# Altium footprint library Package_DFN_QFN.PcbLib: 735 footprints (part 24 of 46)
Each footprint in its own frame and in the unit in brackets; x right, y up, seen from the top. Pads: shape width x height; smd on the part's side, far side on the other; paste and mask are expansions set on the pad; w line width, h text height; cw(c..) or ccw(c..) is an arc to the next point about the centre after c.
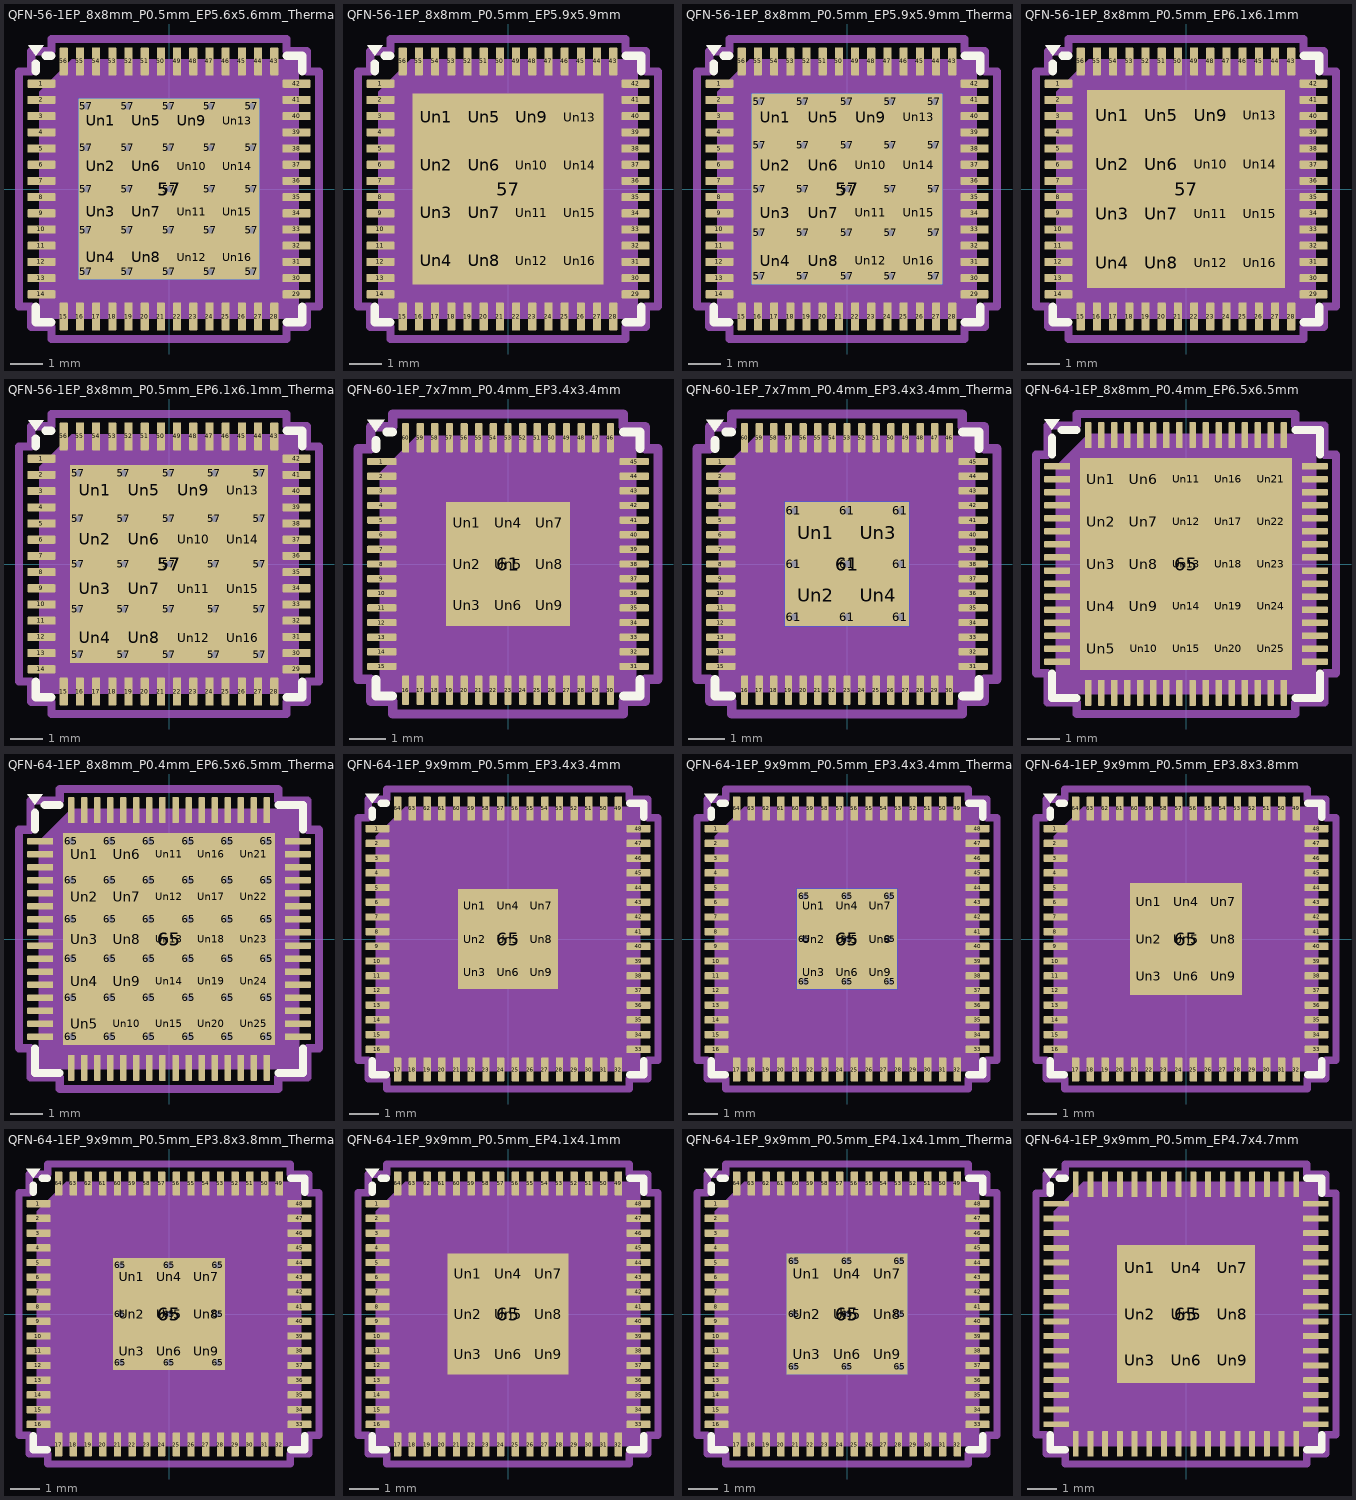
[diagram p23: the footprints below, top view; thin cyan lines are the x and y axes]

## QFN-56-1EP_8x8mm_P0.5mm_EP5.6x5.6mm_ThermalVias [mm] "QFN-56-1EP_8x8mm_P0.5mm_EP5.6x5.6mm_ThermalVias"
pads (99):
  rrect25% 0.875x0.25 smd: 1(-3.938,3.25) 2(-3.938,2.75) 3(-3.938,2.25) 4(-3.938,1.75) 5(-3.938,1.25) 6(-3.938,0.75) 7(-3.938,0.25) 8(-3.938,-0.25) 9(-3.938,-0.75) 10(-3.938,-1.25) 11(-3.938,-1.75) 12(-3.938,-2.25) 13(-3.938,-2.75) 14(-3.938,-3.25) 29(3.938,-3.25) 30(3.938,-2.75) 31(3.938,-2.25) 32(3.938,-1.75) 33(3.938,-1.25) 34(3.938,-0.75) 35(3.938,-0.25) 36(3.938,0.25) 37(3.938,0.75) 38(3.938,1.25) 39(3.938,1.75) 40(3.938,2.25) 41(3.938,2.75) 42(3.938,3.25)
  rrect25% 0.25x0.875 smd: 15(-3.25,-3.938) 16(-2.75,-3.938) 17(-2.25,-3.938) 18(-1.75,-3.938) 19(-1.25,-3.938) 20(-0.75,-3.938) 21(-0.25,-3.938) 22(0.25,-3.938) 23(0.75,-3.938) 24(1.25,-3.938) 25(1.75,-3.938) 26(2.25,-3.938) 27(2.75,-3.938) 28(3.25,-3.938) 43(3.25,3.938) 44(2.75,3.938) 45(2.25,3.938) 46(1.75,3.938) 47(1.25,3.938) 48(0.75,3.938) 49(0.25,3.938) 50(-0.25,3.938) 51(-0.75,3.938) 52(-1.25,3.938) 53(-1.75,3.938) 54(-2.25,3.938) 55(-2.75,3.938) 56(-3.25,3.938)
  round 0.5 hole 0.2: 57(-2.55,-2.55) 57(-2.55,-1.275) 57(-2.55,0) 57(-2.55,1.275) 57(-2.55,2.55) 57(-1.275,-2.55) 57(-1.275,-1.275) 57(-1.275,0) 57(-1.275,1.275) 57(-1.275,2.55) 57(0,-2.55) 57(0,-1.275) 57(0,0) 57(0,1.275) 57(0,2.55) 57(1.275,-2.55) 57(1.275,-1.275) 57(1.275,0) 57(1.275,1.275) 57(1.275,2.55) 57(2.55,-2.55) 57(2.55,-1.275) 57(2.55,0) 57(2.55,1.275) 57(2.55,2.55)
  rect 5.6x5.6 smd: 57(0,0)
  rect 5.6x5.6 smd far side: 57(0,0)
  rrect23% 1.08x1.08 on Top Paste: Un1(-2.1,2.1) Un2(-2.1,0.7) Un3(-2.1,-0.7) Un4(-2.1,-2.1) Un5(-0.7,2.1) Un6(-0.7,0.7) Un7(-0.7,-0.7) Un8(-0.7,-2.1) Un9(0.7,2.1) Un10(0.7,0.7) Un11(0.7,-0.7) Un12(0.7,-2.1) Un13(2.1,2.1) Un14(2.1,0.7) Un15(2.1,-0.7) Un16(2.1,-2.1)
F.SilkS:
  region: -4.11,4.11 -4.35,4.44 -3.87,4.44
  lines w0.254: -4.11,-3.635 -4.11,-4.11 -3.635,-4.11 ; -4.11,3.635 -4.11,3.87 ; -3.81,4.11 -3.635,4.11 ; 3.635,-4.11 4.11,-4.11 4.11,-3.635 ; 3.635,4.11 4.11,4.11 4.11,3.635
Top Component Center:
  lines w0.127: -0.127,0 0.127,0 -0.127,0 ; 0,-0.127 0,0.127 0,-0.127
Top Assembly:
  region: 4,-4 -4,-4 -4,3 -3,4 4,4
Top Courtyard:
  lines w0.254: -4.63,-3.63 -4.63,3.63 -4.25,3.63 -4.25,4.25 -3.63,4.25 -3.63,4.63 3.63,4.63 3.63,4.25 4.25,4.25 4.25,3.63 4.63,3.63 4.63,-3.63 4.25,-3.63 4.25,-4.25 3.63,-4.25 3.63,-4.63 -3.63,-4.63 -3.63,-4.25 -4.25,-4.25 -4.25,-3.63 -4.63,-3.63
Top Designator:
  text ".Designator" at -3.43,-0.344 h1.52
3D body "QFN-56-1EP_8x8mm_P0.5mm_EP4.5x5.2mm.step": height 1, standoff 0, extent -4,-4 4,4

## QFN-56-1EP_8x8mm_P0.5mm_EP5.9x5.9mm [mm] "QFN-56-1EP_8x8mm_P0.5mm_EP5.9x5.9mm"
pads (73):
  rrect25% 0.875x0.25 smd: 1(-3.938,3.25) 2(-3.938,2.75) 3(-3.938,2.25) 4(-3.938,1.75) 5(-3.938,1.25) 6(-3.938,0.75) 7(-3.938,0.25) 8(-3.938,-0.25) 9(-3.938,-0.75) 10(-3.938,-1.25) 11(-3.938,-1.75) 12(-3.938,-2.25) 13(-3.938,-2.75) 14(-3.938,-3.25) 29(3.938,-3.25) 30(3.938,-2.75) 31(3.938,-2.25) 32(3.938,-1.75) 33(3.938,-1.25) 34(3.938,-0.75) 35(3.938,-0.25) 36(3.938,0.25) 37(3.938,0.75) 38(3.938,1.25) 39(3.938,1.75) 40(3.938,2.25) 41(3.938,2.75) 42(3.938,3.25)
  rrect25% 0.25x0.875 smd: 15(-3.25,-3.938) 16(-2.75,-3.938) 17(-2.25,-3.938) 18(-1.75,-3.938) 19(-1.25,-3.938) 20(-0.75,-3.938) 21(-0.25,-3.938) 22(0.25,-3.938) 23(0.75,-3.938) 24(1.25,-3.938) 25(1.75,-3.938) 26(2.25,-3.938) 27(2.75,-3.938) 28(3.25,-3.938) 43(3.25,3.938) 44(2.75,3.938) 45(2.25,3.938) 46(1.75,3.938) 47(1.25,3.938) 48(0.75,3.938) 49(0.25,3.938) 50(-0.25,3.938) 51(-0.75,3.938) 52(-1.25,3.938) 53(-1.75,3.938) 54(-2.25,3.938) 55(-2.75,3.938) 56(-3.25,3.938)
  rect 5.9x5.9 smd: 57(0,0)
  rrect21% 1.19x1.19 on Top Paste: Un1(-2.22,2.22) Un2(-2.22,0.74) Un3(-2.22,-0.74) Un4(-2.22,-2.22) Un5(-0.74,2.22) Un6(-0.74,0.74) Un7(-0.74,-0.74) Un8(-0.74,-2.22) Un9(0.74,2.22) Un10(0.74,0.74) Un11(0.74,-0.74) Un12(0.74,-2.22) Un13(2.22,2.22) Un14(2.22,0.74) Un15(2.22,-0.74) Un16(2.22,-2.22)
F.SilkS:
  region: -4.11,4.11 -4.35,4.44 -3.87,4.44
  lines w0.254: -4.11,-3.635 -4.11,-4.11 -3.635,-4.11 ; -4.11,3.635 -4.11,3.87 ; -3.81,4.11 -3.635,4.11 ; 3.635,-4.11 4.11,-4.11 4.11,-3.635 ; 3.635,4.11 4.11,4.11 4.11,3.635
Top Component Center:
  lines w0.127: -0.127,0 0.127,0 -0.127,0 ; 0,-0.127 0,0.127 0,-0.127
Top Assembly:
  region: 4,-4 -4,-4 -4,3 -3,4 4,4
Top Courtyard:
  lines w0.254: -4.63,-3.63 -4.63,3.63 -4.25,3.63 -4.25,4.25 -3.63,4.25 -3.63,4.63 3.63,4.63 3.63,4.25 4.25,4.25 4.25,3.63 4.63,3.63 4.63,-3.63 4.25,-3.63 4.25,-4.25 3.63,-4.25 3.63,-4.63 -3.63,-4.63 -3.63,-4.25 -4.25,-4.25 -4.25,-3.63 -4.63,-3.63
Top Designator:
  text ".Designator" at -3.43,-0.344 h1.52
3D body "QFN-56-1EP_8x8mm_P0.5mm_EP4.5x5.2mm.step": height 1, standoff 0, extent -4,-4 4,4

## QFN-56-1EP_8x8mm_P0.5mm_EP5.9x5.9mm_ThermalVias [mm] "QFN-56-1EP_8x8mm_P0.5mm_EP5.9x5.9mm_ThermalVias"
pads (99):
  rrect25% 0.875x0.25 smd: 1(-3.938,3.25) 2(-3.938,2.75) 3(-3.938,2.25) 4(-3.938,1.75) 5(-3.938,1.25) 6(-3.938,0.75) 7(-3.938,0.25) 8(-3.938,-0.25) 9(-3.938,-0.75) 10(-3.938,-1.25) 11(-3.938,-1.75) 12(-3.938,-2.25) 13(-3.938,-2.75) 14(-3.938,-3.25) 29(3.938,-3.25) 30(3.938,-2.75) 31(3.938,-2.25) 32(3.938,-1.75) 33(3.938,-1.25) 34(3.938,-0.75) 35(3.938,-0.25) 36(3.938,0.25) 37(3.938,0.75) 38(3.938,1.25) 39(3.938,1.75) 40(3.938,2.25) 41(3.938,2.75) 42(3.938,3.25)
  rrect25% 0.25x0.875 smd: 15(-3.25,-3.938) 16(-2.75,-3.938) 17(-2.25,-3.938) 18(-1.75,-3.938) 19(-1.25,-3.938) 20(-0.75,-3.938) 21(-0.25,-3.938) 22(0.25,-3.938) 23(0.75,-3.938) 24(1.25,-3.938) 25(1.75,-3.938) 26(2.25,-3.938) 27(2.75,-3.938) 28(3.25,-3.938) 43(3.25,3.938) 44(2.75,3.938) 45(2.25,3.938) 46(1.75,3.938) 47(1.25,3.938) 48(0.75,3.938) 49(0.25,3.938) 50(-0.25,3.938) 51(-0.75,3.938) 52(-1.25,3.938) 53(-1.75,3.938) 54(-2.25,3.938) 55(-2.75,3.938) 56(-3.25,3.938)
  round 0.5 hole 0.2: 57(-2.7,-2.7) 57(-2.7,-1.35) 57(-2.7,0) 57(-2.7,1.35) 57(-2.7,2.7) 57(-1.35,-2.7) 57(-1.35,-1.35) 57(-1.35,0) 57(-1.35,1.35) 57(-1.35,2.7) 57(0,-2.7) 57(0,-1.35) 57(0,0) 57(0,1.35) 57(0,2.7) 57(1.35,-2.7) 57(1.35,-1.35) 57(1.35,0) 57(1.35,1.35) 57(1.35,2.7) 57(2.7,-2.7) 57(2.7,-1.35) 57(2.7,0) 57(2.7,1.35) 57(2.7,2.7)
  rect 5.9x5.9 smd: 57(0,0)
  rect 5.9x5.9 smd far side: 57(0,0)
  rrect22% 1.14x1.14 on Top Paste: Un1(-2.22,2.22) Un2(-2.22,0.74) Un3(-2.22,-0.74) Un4(-2.22,-2.22) Un5(-0.74,2.22) Un6(-0.74,0.74) Un7(-0.74,-0.74) Un8(-0.74,-2.22) Un9(0.74,2.22) Un10(0.74,0.74) Un11(0.74,-0.74) Un12(0.74,-2.22) Un13(2.22,2.22) Un14(2.22,0.74) Un15(2.22,-0.74) Un16(2.22,-2.22)
F.SilkS:
  region: -4.11,4.11 -4.35,4.44 -3.87,4.44
  lines w0.254: -4.11,-3.635 -4.11,-4.11 -3.635,-4.11 ; -4.11,3.635 -4.11,3.87 ; -3.81,4.11 -3.635,4.11 ; 3.635,-4.11 4.11,-4.11 4.11,-3.635 ; 3.635,4.11 4.11,4.11 4.11,3.635
Top Component Center:
  lines w0.127: -0.127,0 0.127,0 -0.127,0 ; 0,-0.127 0,0.127 0,-0.127
Top Assembly:
  region: 4,-4 -4,-4 -4,3 -3,4 4,4
Top Courtyard:
  lines w0.254: -4.63,-3.63 -4.63,3.63 -4.25,3.63 -4.25,4.25 -3.63,4.25 -3.63,4.63 3.63,4.63 3.63,4.25 4.25,4.25 4.25,3.63 4.63,3.63 4.63,-3.63 4.25,-3.63 4.25,-4.25 3.63,-4.25 3.63,-4.63 -3.63,-4.63 -3.63,-4.25 -4.25,-4.25 -4.25,-3.63 -4.63,-3.63
Top Designator:
  text ".Designator" at -3.43,-0.344 h1.52

## QFN-56-1EP_8x8mm_P0.5mm_EP6.1x6.1mm [mm] "QFN-56-1EP_8x8mm_P0.5mm_EP6.1x6.1mm"
pads (73):
  rrect25% 0.875x0.25 smd: 1(-3.938,3.25) 2(-3.938,2.75) 3(-3.938,2.25) 4(-3.938,1.75) 5(-3.938,1.25) 6(-3.938,0.75) 7(-3.938,0.25) 8(-3.938,-0.25) 9(-3.938,-0.75) 10(-3.938,-1.25) 11(-3.938,-1.75) 12(-3.938,-2.25) 13(-3.938,-2.75) 14(-3.938,-3.25) 29(3.938,-3.25) 30(3.938,-2.75) 31(3.938,-2.25) 32(3.938,-1.75) 33(3.938,-1.25) 34(3.938,-0.75) 35(3.938,-0.25) 36(3.938,0.25) 37(3.938,0.75) 38(3.938,1.25) 39(3.938,1.75) 40(3.938,2.25) 41(3.938,2.75) 42(3.938,3.25)
  rrect25% 0.25x0.875 smd: 15(-3.25,-3.938) 16(-2.75,-3.938) 17(-2.25,-3.938) 18(-1.75,-3.938) 19(-1.25,-3.938) 20(-0.75,-3.938) 21(-0.25,-3.938) 22(0.25,-3.938) 23(0.75,-3.938) 24(1.25,-3.938) 25(1.75,-3.938) 26(2.25,-3.938) 27(2.75,-3.938) 28(3.25,-3.938) 43(3.25,3.938) 44(2.75,3.938) 45(2.25,3.938) 46(1.75,3.938) 47(1.25,3.938) 48(0.75,3.938) 49(0.25,3.938) 50(-0.25,3.938) 51(-0.75,3.938) 52(-1.25,3.938) 53(-1.75,3.938) 54(-2.25,3.938) 55(-2.75,3.938) 56(-3.25,3.938)
  rect 6.1x6.1 smd: 57(0,0)
  rrect20% 1.23x1.23 on Top Paste: Un1(-2.28,2.28) Un2(-2.28,0.76) Un3(-2.28,-0.76) Un4(-2.28,-2.28) Un5(-0.76,2.28) Un6(-0.76,0.76) Un7(-0.76,-0.76) Un8(-0.76,-2.28) Un9(0.76,2.28) Un10(0.76,0.76) Un11(0.76,-0.76) Un12(0.76,-2.28) Un13(2.28,2.28) Un14(2.28,0.76) Un15(2.28,-0.76) Un16(2.28,-2.28)
F.SilkS:
  region: -4.11,4.11 -4.35,4.44 -3.87,4.44
  lines w0.254: -4.11,-3.635 -4.11,-4.11 -3.635,-4.11 ; -4.11,3.635 -4.11,3.87 ; -3.81,4.11 -3.635,4.11 ; 3.635,-4.11 4.11,-4.11 4.11,-3.635 ; 3.635,4.11 4.11,4.11 4.11,3.635
Top Component Center:
  lines w0.127: -0.127,0 0.127,0 -0.127,0 ; 0,-0.127 0,0.127 0,-0.127
Top Assembly:
  region: 4,-4 -4,-4 -4,3 -3,4 4,4
Top Courtyard:
  lines w0.254: -4.63,-3.63 -4.25,-3.63 -4.25,-4.25 -3.63,-4.25 -3.63,-4.63 3.63,-4.63 3.63,-4.25 4.25,-4.25 4.25,-3.63 4.63,-3.63 4.63,3.63 4.25,3.63 4.25,4.25 3.63,4.25 3.63,4.63 -3.63,4.63 -3.63,4.25 -4.25,4.25 -4.25,3.63 -4.63,3.63 -4.63,-3.63
Top Designator:
  text ".Designator" at -3.43,-0.344 h1.52
3D body "QFN-56-1EP_8x8mm_P0.5mm_EP4.5x5.2mm.step": height 1, standoff 0, extent -4,-4 4,4

## QFN-56-1EP_8x8mm_P0.5mm_EP6.1x6.1mm_ThermalVias [mm] "QFN-56-1EP_8x8mm_P0.5mm_EP6.1x6.1mm_ThermalVias"
pads (99):
  rrect25% 0.875x0.25 smd: 1(-3.938,3.25) 2(-3.938,2.75) 3(-3.938,2.25) 4(-3.938,1.75) 5(-3.938,1.25) 6(-3.938,0.75) 7(-3.938,0.25) 8(-3.938,-0.25) 9(-3.938,-0.75) 10(-3.938,-1.25) 11(-3.938,-1.75) 12(-3.938,-2.25) 13(-3.938,-2.75) 14(-3.938,-3.25) 29(3.938,-3.25) 30(3.938,-2.75) 31(3.938,-2.25) 32(3.938,-1.75) 33(3.938,-1.25) 34(3.938,-0.75) 35(3.938,-0.25) 36(3.938,0.25) 37(3.938,0.75) 38(3.938,1.25) 39(3.938,1.75) 40(3.938,2.25) 41(3.938,2.75) 42(3.938,3.25)
  rrect25% 0.25x0.875 smd: 15(-3.25,-3.938) 16(-2.75,-3.938) 17(-2.25,-3.938) 18(-1.75,-3.938) 19(-1.25,-3.938) 20(-0.75,-3.938) 21(-0.25,-3.938) 22(0.25,-3.938) 23(0.75,-3.938) 24(1.25,-3.938) 25(1.75,-3.938) 26(2.25,-3.938) 27(2.75,-3.938) 28(3.25,-3.938) 43(3.25,3.938) 44(2.75,3.938) 45(2.25,3.938) 46(1.75,3.938) 47(1.25,3.938) 48(0.75,3.938) 49(0.25,3.938) 50(-0.25,3.938) 51(-0.75,3.938) 52(-1.25,3.938) 53(-1.75,3.938) 54(-2.25,3.938) 55(-2.75,3.938) 56(-3.25,3.938)
  round 0.5 hole 0.2: 57(-2.8,-2.8) 57(-2.8,-1.4) 57(-2.8,0) 57(-2.8,1.4) 57(-2.8,2.8) 57(-1.4,-2.8) 57(-1.4,-1.4) 57(-1.4,0) 57(-1.4,1.4) 57(-1.4,2.8) 57(0,-2.8) 57(0,-1.4) 57(0,0) 57(0,1.4) 57(0,2.8) 57(1.4,-2.8) 57(1.4,-1.4) 57(1.4,0) 57(1.4,1.4) 57(1.4,2.8) 57(2.8,-2.8) 57(2.8,-1.4) 57(2.8,0) 57(2.8,1.4) 57(2.8,2.8)
  rect 6.1x6.1 smd: 57(0,0)
  rect 6.1x6.1 smd far side: 57(0,0)
  rrect21% 1.18x1.18 on Top Paste: Un1(-2.28,2.28) Un2(-2.28,0.76) Un3(-2.28,-0.76) Un4(-2.28,-2.28) Un5(-0.76,2.28) Un6(-0.76,0.76) Un7(-0.76,-0.76) Un8(-0.76,-2.28) Un9(0.76,2.28) Un10(0.76,0.76) Un11(0.76,-0.76) Un12(0.76,-2.28) Un13(2.28,2.28) Un14(2.28,0.76) Un15(2.28,-0.76) Un16(2.28,-2.28)
F.SilkS:
  region: -4.11,4.11 -4.35,4.44 -3.87,4.44
  lines w0.254: -4.11,-3.635 -4.11,-4.11 -3.635,-4.11 ; -4.11,3.635 -4.11,3.87 ; -3.81,4.11 -3.635,4.11 ; 3.635,-4.11 4.11,-4.11 4.11,-3.635 ; 3.635,4.11 4.11,4.11 4.11,3.635
Top Component Center:
  lines w0.127: -0.127,0 0.127,0 -0.127,0 ; 0,-0.127 0,0.127 0,-0.127
Top Assembly:
  region: 4,-4 -4,-4 -4,3 -3,4 4,4
Top Courtyard:
  lines w0.254: -4.63,-3.63 -4.63,3.63 -4.25,3.63 -4.25,4.25 -3.63,4.25 -3.63,4.63 3.63,4.63 3.63,4.25 4.25,4.25 4.25,3.63 4.63,3.63 4.63,-3.63 4.25,-3.63 4.25,-4.25 3.63,-4.25 3.63,-4.63 -3.63,-4.63 -3.63,-4.25 -4.25,-4.25 -4.25,-3.63 -4.63,-3.63
Top Designator:
  text ".Designator" at -3.43,-0.344 h1.52
3D body "QFN-56-1EP_8x8mm_P0.5mm_EP4.5x5.2mm.step": height 1, standoff 0, extent -4,-4 4,4

## QFN-60-1EP_7x7mm_P0.4mm_EP3.4x3.4mm [mm] "QFN-60-1EP_7x7mm_P0.4mm_EP3.4x3.4mm"
pads (70):
  rrect25% 0.8x0.2 smd: 1(-3.45,2.8) 2(-3.45,2.4) 3(-3.45,2) 4(-3.45,1.6) 5(-3.45,1.2) 6(-3.45,0.8) 7(-3.45,0.4) 8(-3.45,0) 9(-3.45,-0.4) 10(-3.45,-0.8) 11(-3.45,-1.2) 12(-3.45,-1.6) 13(-3.45,-2) 14(-3.45,-2.4) 15(-3.45,-2.8) 31(3.45,-2.8) 32(3.45,-2.4) 33(3.45,-2) 34(3.45,-1.6) 35(3.45,-1.2) 36(3.45,-0.8) 37(3.45,-0.4) 38(3.45,0) 39(3.45,0.4) 40(3.45,0.8) 41(3.45,1.2) 42(3.45,1.6) 43(3.45,2) 44(3.45,2.4) 45(3.45,2.8)
  rrect25% 0.2x0.8 smd: 16(-2.8,-3.45) 17(-2.4,-3.45) 18(-2,-3.45) 19(-1.6,-3.45) 20(-1.2,-3.45) 21(-0.8,-3.45) 22(-0.4,-3.45) 23(0,-3.45) 24(0.4,-3.45) 25(0.8,-3.45) 26(1.2,-3.45) 27(1.6,-3.45) 28(2,-3.45) 29(2.4,-3.45) 30(2.8,-3.45) 46(2.8,3.45) 47(2.4,3.45) 48(2,3.45) 49(1.6,3.45) 50(1.2,3.45) 51(0.8,3.45) 52(0.4,3.45) 53(0,3.45) 54(-0.4,3.45) 55(-0.8,3.45) 56(-1.2,3.45) 57(-1.6,3.45) 58(-2,3.45) 59(-2.4,3.45) 60(-2.8,3.45)
  rect 3.4x3.4 smd: 61(0,0)
  rrect25% 0.91x0.91 on Top Paste: Un1(-1.13,1.13) Un2(-1.13,0) Un3(-1.13,-1.13) Un4(0,1.13) Un5(0,0) Un6(0,-1.13) Un7(1.13,1.13) Un8(1.13,0) Un9(1.13,-1.13)
F.SilkS:
  region: -3.61,3.61 -3.85,3.94 -3.37,3.94
  lines w0.254: -3.61,-3.16 -3.61,-3.61 -3.16,-3.61 ; -3.61,3.16 -3.61,3.37 ; -3.31,3.61 -3.16,3.61 ; 3.16,-3.61 3.61,-3.61 3.61,-3.16 ; 3.16,3.61 3.61,3.61 3.61,3.16
Top Component Center:
  lines w0.127: -0.127,0 0.127,0 -0.127,0 ; 0,-0.127 0,0.127 0,-0.127
Top Assembly:
  region: 3.5,-3.5 -3.5,-3.5 -3.5,2.5 -2.5,3.5 3.5,3.5
Top Courtyard:
  lines w0.254: -4.1,-3.15 -3.75,-3.15 -3.75,-3.75 -3.15,-3.75 -3.15,-4.1 3.15,-4.1 3.15,-3.75 3.75,-3.75 3.75,-3.15 4.1,-3.15 4.1,3.15 3.75,3.15 3.75,3.75 3.15,3.75 3.15,4.1 -3.15,4.1 -3.15,3.75 -3.75,3.75 -3.75,3.15 -4.1,3.15 -4.1,-3.15
Top Designator:
  text ".Designator" at -3.43,-0.344 h1.52

## QFN-60-1EP_7x7mm_P0.4mm_EP3.4x3.4mm_ThermalVias [mm] "QFN-60-1EP_7x7mm_P0.4mm_EP3.4x3.4mm_ThermalVias"
pads (75):
  rrect25% 0.8x0.2 smd: 1(-3.45,2.8) 2(-3.45,2.4) 3(-3.45,2) 4(-3.45,1.6) 5(-3.45,1.2) 6(-3.45,0.8) 7(-3.45,0.4) 8(-3.45,0) 9(-3.45,-0.4) 10(-3.45,-0.8) 11(-3.45,-1.2) 12(-3.45,-1.6) 13(-3.45,-2) 14(-3.45,-2.4) 15(-3.45,-2.8) 31(3.45,-2.8) 32(3.45,-2.4) 33(3.45,-2) 34(3.45,-1.6) 35(3.45,-1.2) 36(3.45,-0.8) 37(3.45,-0.4) 38(3.45,0) 39(3.45,0.4) 40(3.45,0.8) 41(3.45,1.2) 42(3.45,1.6) 43(3.45,2) 44(3.45,2.4) 45(3.45,2.8)
  rrect25% 0.2x0.8 smd: 16(-2.8,-3.45) 17(-2.4,-3.45) 18(-2,-3.45) 19(-1.6,-3.45) 20(-1.2,-3.45) 21(-0.8,-3.45) 22(-0.4,-3.45) 23(0,-3.45) 24(0.4,-3.45) 25(0.8,-3.45) 26(1.2,-3.45) 27(1.6,-3.45) 28(2,-3.45) 29(2.4,-3.45) 30(2.8,-3.45) 46(2.8,3.45) 47(2.4,3.45) 48(2,3.45) 49(1.6,3.45) 50(1.2,3.45) 51(0.8,3.45) 52(0.4,3.45) 53(0,3.45) 54(-0.4,3.45) 55(-0.8,3.45) 56(-1.2,3.45) 57(-1.6,3.45) 58(-2,3.45) 59(-2.4,3.45) 60(-2.8,3.45)
  round 0.5 hole 0.2: 61(-1.45,-1.45) 61(-1.45,0) 61(-1.45,1.45) 61(0,-1.45) 61(0,0) 61(0,1.45) 61(1.45,-1.45) 61(1.45,0) 61(1.45,1.45)
  rect 3.4x3.4 smd: 61(0,0)
  rect 3.4x3.4 smd far side: 61(0,0)
  rrect19% 1.32x1.32 on Top Paste: Un1(-0.85,0.85) Un2(-0.85,-0.85) Un3(0.85,0.85) Un4(0.85,-0.85)
F.SilkS:
  region: -3.61,3.61 -3.85,3.94 -3.37,3.94
  lines w0.254: -3.61,-3.16 -3.61,-3.61 -3.16,-3.61 ; -3.61,3.16 -3.61,3.37 ; -3.31,3.61 -3.16,3.61 ; 3.16,-3.61 3.61,-3.61 3.61,-3.16 ; 3.16,3.61 3.61,3.61 3.61,3.16
Top Component Center:
  lines w0.127: -0.127,0 0.127,0 -0.127,0 ; 0,-0.127 0,0.127 0,-0.127
Top Assembly:
  region: 3.5,-3.5 -3.5,-3.5 -3.5,2.5 -2.5,3.5 3.5,3.5
Top Courtyard:
  lines w0.254: -4.1,-3.15 -4.1,3.15 -3.75,3.15 -3.75,3.75 -3.15,3.75 -3.15,4.1 3.15,4.1 3.15,3.75 3.75,3.75 3.75,3.15 4.1,3.15 4.1,-3.15 3.75,-3.15 3.75,-3.75 3.15,-3.75 3.15,-4.1 -3.15,-4.1 -3.15,-3.75 -3.75,-3.75 -3.75,-3.15 -4.1,-3.15
Top Designator:
  text ".Designator" at -3.43,-0.344 h1.52

## QFN-64-1EP_8x8mm_P0.4mm_EP6.5x6.5mm [mm] "QFN-64-1EP_8x8mm_P0.4mm_EP6.5x6.5mm"
pads (90):
  rrect25% 0.8x0.2 smd: 1(-3.95,3) 2(-3.95,2.6) 3(-3.95,2.2) 4(-3.95,1.8) 5(-3.95,1.4) 6(-3.95,1) 7(-3.95,0.6) 8(-3.95,0.2) 9(-3.95,-0.2) 10(-3.95,-0.6) 11(-3.95,-1) 12(-3.95,-1.4) 13(-3.95,-1.8) 14(-3.95,-2.2) 15(-3.95,-2.6) 16(-3.95,-3) 33(3.95,-3) 34(3.95,-2.6) 35(3.95,-2.2) 36(3.95,-1.8) 37(3.95,-1.4) 38(3.95,-1) 39(3.95,-0.6) 40(3.95,-0.2) 41(3.95,0.2) 42(3.95,0.6) 43(3.95,1) 44(3.95,1.4) 45(3.95,1.8) 46(3.95,2.2) 47(3.95,2.6) 48(3.95,3)
  rrect25% 0.2x0.8 smd: 17(-3,-3.95) 18(-2.6,-3.95) 19(-2.2,-3.95) 20(-1.8,-3.95) 21(-1.4,-3.95) 22(-1,-3.95) 23(-0.6,-3.95) 24(-0.2,-3.95) 25(0.2,-3.95) 26(0.6,-3.95) 27(1,-3.95) 28(1.4,-3.95) 29(1.8,-3.95) 30(2.2,-3.95) 31(2.6,-3.95) 32(3,-3.95) 49(3,3.95) 50(2.6,3.95) 51(2.2,3.95) 52(1.8,3.95) 53(1.4,3.95) 54(1,3.95) 55(0.6,3.95) 56(0.2,3.95) 57(-0.2,3.95) 58(-0.6,3.95) 59(-1,3.95) 60(-1.4,3.95) 61(-1.8,3.95) 62(-2.2,3.95) 63(-2.6,3.95) 64(-3,3.95)
  rect 6.5x6.5 smd: 65(0,0)
  rrect24% 1.05x1.05 on Top Paste: Un1(-2.6,2.6) Un2(-2.6,1.3) Un3(-2.6,0) Un4(-2.6,-1.3) Un5(-2.6,-2.6) Un6(-1.3,2.6) Un7(-1.3,1.3) Un8(-1.3,0) Un9(-1.3,-1.3) Un10(-1.3,-2.6) Un11(0,2.6) Un12(0,1.3) Un13(0,0) Un14(0,-1.3) Un15(0,-2.6) Un16(1.3,2.6) Un17(1.3,1.3) Un18(1.3,0) Un19(1.3,-1.3) Un20(1.3,-2.6) Un21(2.6,2.6) Un22(2.6,1.3) Un23(2.6,0) Un24(2.6,-1.3) Un25(2.6,-2.6)
F.SilkS:
  region: -4.11,4.11 -4.35,4.44 -3.87,4.44
  lines w0.254: -4.11,-3.36 -4.11,-4.11 -3.36,-4.11 ; -4.11,3.36 -4.11,3.87 ; -3.81,4.11 -3.36,4.11 ; 3.36,-4.11 4.11,-4.11 4.11,-3.36 ; 3.36,4.11 4.11,4.11 4.11,3.36
Top Component Center:
  lines w0.127: -0.127,0 0.127,0 -0.127,0 ; 0,-0.127 0,0.127 0,-0.127
Top Assembly:
  region: 4,-4 -4,-4 -4,3 -3,4 4,4
Top Courtyard:
  lines w0.254: -4.6,-3.35 -4.25,-3.35 -4.25,-4.25 -3.35,-4.25 -3.35,-4.6 3.35,-4.6 3.35,-4.25 4.25,-4.25 4.25,-3.35 4.6,-3.35 4.6,3.35 4.25,3.35 4.25,4.25 3.35,4.25 3.35,4.6 -3.35,4.6 -3.35,4.25 -4.25,4.25 -4.25,3.35 -4.6,3.35 -4.6,-3.35
Top Designator:
  text ".Designator" at -3.43,-0.344 h1.52
3D body "QFN-64-1EP_8x8mm_P0.4mm_EP6.5x6.5mm.step": height 0.87, standoff 0, extent -4,-4 4,4

## QFN-64-1EP_8x8mm_P0.4mm_EP6.5x6.5mm_ThermalVias [mm] "QFN-64-1EP_8x8mm_P0.4mm_EP6.5x6.5mm_ThermalVias"
pads (127):
  rrect25% 0.8x0.2 smd: 1(-3.95,3) 2(-3.95,2.6) 3(-3.95,2.2) 4(-3.95,1.8) 5(-3.95,1.4) 6(-3.95,1) 7(-3.95,0.6) 8(-3.95,0.2) 9(-3.95,-0.2) 10(-3.95,-0.6) 11(-3.95,-1) 12(-3.95,-1.4) 13(-3.95,-1.8) 14(-3.95,-2.2) 15(-3.95,-2.6) 16(-3.95,-3) 33(3.95,-3) 34(3.95,-2.6) 35(3.95,-2.2) 36(3.95,-1.8) 37(3.95,-1.4) 38(3.95,-1) 39(3.95,-0.6) 40(3.95,-0.2) 41(3.95,0.2) 42(3.95,0.6) 43(3.95,1) 44(3.95,1.4) 45(3.95,1.8) 46(3.95,2.2) 47(3.95,2.6) 48(3.95,3)
  rrect25% 0.2x0.8 smd: 17(-3,-3.95) 18(-2.6,-3.95) 19(-2.2,-3.95) 20(-1.8,-3.95) 21(-1.4,-3.95) 22(-1,-3.95) 23(-0.6,-3.95) 24(-0.2,-3.95) 25(0.2,-3.95) 26(0.6,-3.95) 27(1,-3.95) 28(1.4,-3.95) 29(1.8,-3.95) 30(2.2,-3.95) 31(2.6,-3.95) 32(3,-3.95) 49(3,3.95) 50(2.6,3.95) 51(2.2,3.95) 52(1.8,3.95) 53(1.4,3.95) 54(1,3.95) 55(0.6,3.95) 56(0.2,3.95) 57(-0.2,3.95) 58(-0.6,3.95) 59(-1,3.95) 60(-1.4,3.95) 61(-1.8,3.95) 62(-2.2,3.95) 63(-2.6,3.95) 64(-3,3.95)
  round 0.5 hole 0.2: 65(-3,-3) 65(-3,-1.8) 65(-3,-0.6) 65(-3,0.6) 65(-3,1.8) 65(-3,3) 65(-1.8,-3) 65(-1.8,-1.8) 65(-1.8,-0.6) 65(-1.8,0.6) 65(-1.8,1.8) 65(-1.8,3) 65(-0.6,-3) 65(-0.6,-1.8) 65(-0.6,-0.6) 65(-0.6,0.6) 65(-0.6,1.8) 65(-0.6,3) 65(0.6,-3) 65(0.6,-1.8) 65(0.6,-0.6) 65(0.6,0.6) 65(0.6,1.8) 65(0.6,3) 65(1.8,-3) 65(1.8,-1.8) 65(1.8,-0.6) 65(1.8,0.6) 65(1.8,1.8) 65(1.8,3) 65(3,-3) 65(3,-1.8) 65(3,-0.6) 65(3,0.6) 65(3,1.8) 65(3,3)
  rect 6.5x6.5 smd: 65(0,0)
  rect 6.5x6.5 smd far side: 65(0,0)
  rrect25% 1.01x1.01 on Top Paste: Un1(-2.6,2.6) Un2(-2.6,1.3) Un3(-2.6,0) Un4(-2.6,-1.3) Un5(-2.6,-2.6) Un6(-1.3,2.6) Un7(-1.3,1.3) Un8(-1.3,0) Un9(-1.3,-1.3) Un10(-1.3,-2.6) Un11(0,2.6) Un12(0,1.3) Un13(0,0) Un14(0,-1.3) Un15(0,-2.6) Un16(1.3,2.6) Un17(1.3,1.3) Un18(1.3,0) Un19(1.3,-1.3) Un20(1.3,-2.6) Un21(2.6,2.6) Un22(2.6,1.3) Un23(2.6,0) Un24(2.6,-1.3) Un25(2.6,-2.6)
F.SilkS:
  region: -4.11,4.11 -4.35,4.44 -3.87,4.44
  lines w0.254: -4.11,-3.36 -4.11,-4.11 -3.36,-4.11 ; -4.11,3.36 -4.11,3.87 ; -3.81,4.11 -3.36,4.11 ; 3.36,-4.11 4.11,-4.11 4.11,-3.36 ; 3.36,4.11 4.11,4.11 4.11,3.36
Top Component Center:
  lines w0.127: -0.127,0 0.127,0 -0.127,0 ; 0,-0.127 0,0.127 0,-0.127
Top Assembly:
  region: 4,-4 -4,-4 -4,3 -3,4 4,4
Top Courtyard:
  lines w0.254: -4.6,-3.35 -4.6,3.35 -4.25,3.35 -4.25,4.25 -3.35,4.25 -3.35,4.6 3.35,4.6 3.35,4.25 4.25,4.25 4.25,3.35 4.6,3.35 4.6,-3.35 4.25,-3.35 4.25,-4.25 3.35,-4.25 3.35,-4.6 -3.35,-4.6 -3.35,-4.25 -4.25,-4.25 -4.25,-3.35 -4.6,-3.35
Top Designator:
  text ".Designator" at -3.43,-0.344 h1.52
3D body "QFN-64-1EP_8x8mm_P0.4mm_EP6.5x6.5mm.step": height 0.87, standoff 0, extent -4,-4 4,4

## QFN-64-1EP_9x9mm_P0.5mm_EP3.4x3.4mm [mm] "QFN-64-1EP_9x9mm_P0.5mm_EP3.4x3.4mm"
pads (74):
  rrect25% 0.825x0.25 smd: 1(-4.437,3.75) 2(-4.437,3.25) 3(-4.437,2.75) 4(-4.437,2.25) 5(-4.437,1.75) 6(-4.437,1.25) 7(-4.437,0.75) 8(-4.437,0.25) 9(-4.437,-0.25) 10(-4.437,-0.75) 11(-4.437,-1.25) 12(-4.437,-1.75) 13(-4.437,-2.25) 14(-4.437,-2.75) 15(-4.437,-3.25) 16(-4.437,-3.75) 33(4.437,-3.75) 34(4.437,-3.25) 35(4.437,-2.75) 36(4.437,-2.25) 37(4.437,-1.75) 38(4.437,-1.25) 39(4.437,-0.75) 40(4.437,-0.25) 41(4.437,0.25) 42(4.437,0.75) 43(4.437,1.25) 44(4.437,1.75) 45(4.437,2.25) 46(4.437,2.75) 47(4.437,3.25) 48(4.437,3.75)
  rrect25% 0.25x0.825 smd: 17(-3.75,-4.437) 18(-3.25,-4.437) 19(-2.75,-4.437) 20(-2.25,-4.437) 21(-1.75,-4.437) 22(-1.25,-4.437) 23(-0.75,-4.437) 24(-0.25,-4.437) 25(0.25,-4.437) 26(0.75,-4.437) 27(1.25,-4.437) 28(1.75,-4.437) 29(2.25,-4.437) 30(2.75,-4.437) 31(3.25,-4.437) 32(3.75,-4.437) 49(3.75,4.437) 50(3.25,4.437) 51(2.75,4.437) 52(2.25,4.437) 53(1.75,4.437) 54(1.25,4.437) 55(0.75,4.437) 56(0.25,4.437) 57(-0.25,4.437) 58(-0.75,4.437) 59(-1.25,4.437) 60(-1.75,4.437) 61(-2.25,4.437) 62(-2.75,4.437) 63(-3.25,4.437) 64(-3.75,4.437)
  rect 3.4x3.4 smd: 65(0,0)
  rrect25% 0.91x0.91 on Top Paste: Un1(-1.13,1.13) Un2(-1.13,0) Un3(-1.13,-1.13) Un4(0,1.13) Un5(0,0) Un6(0,-1.13) Un7(1.13,1.13) Un8(1.13,0) Un9(1.13,-1.13)
F.SilkS:
  region: -4.61,4.61 -4.85,4.94 -4.37,4.94
  lines w0.254: -4.61,-4.135 -4.61,-4.61 -4.135,-4.61 ; -4.61,4.135 -4.61,4.37 ; -4.31,4.61 -4.135,4.61 ; 4.135,-4.61 4.61,-4.61 4.61,-4.135 ; 4.135,4.61 4.61,4.61 4.61,4.135
Top Component Center:
  lines w0.127: -0.127,0 0.127,0 -0.127,0 ; 0,-0.127 0,0.127 0,-0.127
Top Assembly:
  region: 4.5,-4.5 -4.5,-4.5 -4.5,3.5 -3.5,4.5 4.5,4.5
Top Courtyard:
  lines w0.254: -5.1,-4.13 -4.75,-4.13 -4.75,-4.75 -4.13,-4.75 -4.13,-5.1 4.13,-5.1 4.13,-4.75 4.75,-4.75 4.75,-4.13 5.1,-4.13 5.1,4.13 4.75,4.13 4.75,4.75 4.13,4.75 4.13,5.1 -4.13,5.1 -4.13,4.75 -4.75,4.75 -4.75,4.13 -5.1,4.13 -5.1,-4.13
Top Designator:
  text ".Designator" at -3.43,-0.344 h1.52
3D body "QFN-64-1EP_9x9mm_P0.5mm_EP4.1x4.1mm.step": height 0.95, standoff 0, extent -4.5,-4.5 4.5,4.5

## QFN-64-1EP_9x9mm_P0.5mm_EP3.4x3.4mm_ThermalVias [mm] "QFN-64-1EP_9x9mm_P0.5mm_EP3.4x3.4mm_ThermalVias"
pads (84):
  rrect25% 0.825x0.25 smd: 1(-4.437,3.75) 2(-4.437,3.25) 3(-4.437,2.75) 4(-4.437,2.25) 5(-4.437,1.75) 6(-4.437,1.25) 7(-4.437,0.75) 8(-4.437,0.25) 9(-4.437,-0.25) 10(-4.437,-0.75) 11(-4.437,-1.25) 12(-4.437,-1.75) 13(-4.437,-2.25) 14(-4.437,-2.75) 15(-4.437,-3.25) 16(-4.437,-3.75) 33(4.437,-3.75) 34(4.437,-3.25) 35(4.437,-2.75) 36(4.437,-2.25) 37(4.437,-1.75) 38(4.437,-1.25) 39(4.437,-0.75) 40(4.437,-0.25) 41(4.437,0.25) 42(4.437,0.75) 43(4.437,1.25) 44(4.437,1.75) 45(4.437,2.25) 46(4.437,2.75) 47(4.437,3.25) 48(4.437,3.75)
  rrect25% 0.25x0.825 smd: 17(-3.75,-4.437) 18(-3.25,-4.437) 19(-2.75,-4.437) 20(-2.25,-4.437) 21(-1.75,-4.437) 22(-1.25,-4.437) 23(-0.75,-4.437) 24(-0.25,-4.437) 25(0.25,-4.437) 26(0.75,-4.437) 27(1.25,-4.437) 28(1.75,-4.437) 29(2.25,-4.437) 30(2.75,-4.437) 31(3.25,-4.437) 32(3.75,-4.437) 49(3.75,4.437) 50(3.25,4.437) 51(2.75,4.437) 52(2.25,4.437) 53(1.75,4.437) 54(1.25,4.437) 55(0.75,4.437) 56(0.25,4.437) 57(-0.25,4.437) 58(-0.75,4.437) 59(-1.25,4.437) 60(-1.75,4.437) 61(-2.25,4.437) 62(-2.75,4.437) 63(-3.25,4.437) 64(-3.75,4.437)
  round 0.5 hole 0.2: 65(-1.45,-1.45) 65(-1.45,0) 65(-1.45,1.45) 65(0,-1.45) 65(0,0) 65(0,1.45) 65(1.45,-1.45) 65(1.45,0) 65(1.45,1.45)
  rect 3.4x3.4 smd: 65(0,0)
  rect 3.4x3.4 smd far side: 65(0,0)
  rrect25% 0.91x0.91 on Top Paste: Un1(-1.13,1.13) Un2(-1.13,0) Un3(-1.13,-1.13) Un4(0,1.13) Un5(0,0) Un6(0,-1.13) Un7(1.13,1.13) Un8(1.13,0) Un9(1.13,-1.13)
F.SilkS:
  region: -4.61,4.61 -4.85,4.94 -4.37,4.94
  lines w0.254: -4.61,-4.135 -4.61,-4.61 -4.135,-4.61 ; -4.61,4.135 -4.61,4.37 ; -4.31,4.61 -4.135,4.61 ; 4.135,-4.61 4.61,-4.61 4.61,-4.135 ; 4.135,4.61 4.61,4.61 4.61,4.135
Top Component Center:
  lines w0.127: -0.127,0 0.127,0 -0.127,0 ; 0,-0.127 0,0.127 0,-0.127
Top Assembly:
  region: 4.5,-4.5 -4.5,-4.5 -4.5,3.5 -3.5,4.5 4.5,4.5
Top Courtyard:
  lines w0.254: -5.1,-4.13 -4.75,-4.13 -4.75,-4.75 -4.13,-4.75 -4.13,-5.1 4.13,-5.1 4.13,-4.75 4.75,-4.75 4.75,-4.13 5.1,-4.13 5.1,4.13 4.75,4.13 4.75,4.75 4.13,4.75 4.13,5.1 -4.13,5.1 -4.13,4.75 -4.75,4.75 -4.75,4.13 -5.1,4.13 -5.1,-4.13
Top Designator:
  text ".Designator" at -3.43,-0.344 h1.52

## QFN-64-1EP_9x9mm_P0.5mm_EP3.8x3.8mm [mm] "QFN-64-1EP_9x9mm_P0.5mm_EP3.8x3.8mm"
pads (74):
  rrect25% 0.825x0.25 smd: 1(-4.437,3.75) 2(-4.437,3.25) 3(-4.437,2.75) 4(-4.437,2.25) 5(-4.437,1.75) 6(-4.437,1.25) 7(-4.437,0.75) 8(-4.437,0.25) 9(-4.437,-0.25) 10(-4.437,-0.75) 11(-4.437,-1.25) 12(-4.437,-1.75) 13(-4.437,-2.25) 14(-4.437,-2.75) 15(-4.437,-3.25) 16(-4.437,-3.75) 33(4.437,-3.75) 34(4.437,-3.25) 35(4.437,-2.75) 36(4.437,-2.25) 37(4.437,-1.75) 38(4.437,-1.25) 39(4.437,-0.75) 40(4.437,-0.25) 41(4.437,0.25) 42(4.437,0.75) 43(4.437,1.25) 44(4.437,1.75) 45(4.437,2.25) 46(4.437,2.75) 47(4.437,3.25) 48(4.437,3.75)
  rrect25% 0.25x0.825 smd: 17(-3.75,-4.437) 18(-3.25,-4.437) 19(-2.75,-4.437) 20(-2.25,-4.437) 21(-1.75,-4.437) 22(-1.25,-4.437) 23(-0.75,-4.437) 24(-0.25,-4.437) 25(0.25,-4.437) 26(0.75,-4.437) 27(1.25,-4.437) 28(1.75,-4.437) 29(2.25,-4.437) 30(2.75,-4.437) 31(3.25,-4.437) 32(3.75,-4.437) 49(3.75,4.437) 50(3.25,4.437) 51(2.75,4.437) 52(2.25,4.437) 53(1.75,4.437) 54(1.25,4.437) 55(0.75,4.437) 56(0.25,4.437) 57(-0.25,4.437) 58(-0.75,4.437) 59(-1.25,4.437) 60(-1.75,4.437) 61(-2.25,4.437) 62(-2.75,4.437) 63(-3.25,4.437) 64(-3.75,4.437)
  rect 3.8x3.8 smd: 65(0,0)
  rrect25% 1.02x1.02 on Top Paste: Un1(-1.27,1.27) Un2(-1.27,0) Un3(-1.27,-1.27) Un4(0,1.27) Un5(0,0) Un6(0,-1.27) Un7(1.27,1.27) Un8(1.27,0) Un9(1.27,-1.27)
F.SilkS:
  region: -4.61,4.61 -4.85,4.94 -4.37,4.94
  lines w0.254: -4.61,-4.135 -4.61,-4.61 -4.135,-4.61 ; -4.61,4.135 -4.61,4.37 ; -4.31,4.61 -4.135,4.61 ; 4.135,-4.61 4.61,-4.61 4.61,-4.135 ; 4.135,4.61 4.61,4.61 4.61,4.135
Top Component Center:
  lines w0.127: -0.127,0 0.127,0 -0.127,0 ; 0,-0.127 0,0.127 0,-0.127
Top Assembly:
  region: 4.5,-4.5 -4.5,-4.5 -4.5,3.5 -3.5,4.5 4.5,4.5
Top Courtyard:
  lines w0.254: -5.1,-4.13 -5.1,4.13 -4.75,4.13 -4.75,4.75 -4.13,4.75 -4.13,5.1 4.13,5.1 4.13,4.75 4.75,4.75 4.75,4.13 5.1,4.13 5.1,-4.13 4.75,-4.13 4.75,-4.75 4.13,-4.75 4.13,-5.1 -4.13,-5.1 -4.13,-4.75 -4.75,-4.75 -4.75,-4.13 -5.1,-4.13
Top Designator:
  text ".Designator" at -3.43,-0.344 h1.52
3D body "QFN-64-1EP_9x9mm_P0.5mm_EP4.1x4.1mm.step": height 0.95, standoff 0, extent -4.5,-4.5 4.5,4.5

## QFN-64-1EP_9x9mm_P0.5mm_EP3.8x3.8mm_ThermalVias [mm] "QFN-64-1EP_9x9mm_P0.5mm_EP3.8x3.8mm_ThermalVias"
pads (84):
  rrect25% 0.825x0.25 smd: 1(-4.437,3.75) 2(-4.437,3.25) 3(-4.437,2.75) 4(-4.437,2.25) 5(-4.437,1.75) 6(-4.437,1.25) 7(-4.437,0.75) 8(-4.437,0.25) 9(-4.437,-0.25) 10(-4.437,-0.75) 11(-4.437,-1.25) 12(-4.437,-1.75) 13(-4.437,-2.25) 14(-4.437,-2.75) 15(-4.437,-3.25) 16(-4.437,-3.75) 33(4.437,-3.75) 34(4.437,-3.25) 35(4.437,-2.75) 36(4.437,-2.25) 37(4.437,-1.75) 38(4.437,-1.25) 39(4.437,-0.75) 40(4.437,-0.25) 41(4.437,0.25) 42(4.437,0.75) 43(4.437,1.25) 44(4.437,1.75) 45(4.437,2.25) 46(4.437,2.75) 47(4.437,3.25) 48(4.437,3.75)
  rrect25% 0.25x0.825 smd: 17(-3.75,-4.437) 18(-3.25,-4.437) 19(-2.75,-4.437) 20(-2.25,-4.437) 21(-1.75,-4.437) 22(-1.25,-4.437) 23(-0.75,-4.437) 24(-0.25,-4.437) 25(0.25,-4.437) 26(0.75,-4.437) 27(1.25,-4.437) 28(1.75,-4.437) 29(2.25,-4.437) 30(2.75,-4.437) 31(3.25,-4.437) 32(3.75,-4.437) 49(3.75,4.437) 50(3.25,4.437) 51(2.75,4.437) 52(2.25,4.437) 53(1.75,4.437) 54(1.25,4.437) 55(0.75,4.437) 56(0.25,4.437) 57(-0.25,4.437) 58(-0.75,4.437) 59(-1.25,4.437) 60(-1.75,4.437) 61(-2.25,4.437) 62(-2.75,4.437) 63(-3.25,4.437) 64(-3.75,4.437)
  round 0.5 hole 0.2: 65(-1.65,-1.65) 65(-1.65,0) 65(-1.65,1.65) 65(0,-1.65) 65(0,0) 65(0,1.65) 65(1.65,-1.65) 65(1.65,0) 65(1.65,1.65)
  rect 3.8x3.8 smd: 65(0,0)
  rect 3.8x3.8 smd far side: 65(0,0)
  rrect25% 1.02x1.02 on Top Paste: Un1(-1.27,1.27) Un2(-1.27,0) Un3(-1.27,-1.27) Un4(0,1.27) Un5(0,0) Un6(0,-1.27) Un7(1.27,1.27) Un8(1.27,0) Un9(1.27,-1.27)
F.SilkS:
  region: -4.61,4.61 -4.85,4.94 -4.37,4.94
  lines w0.254: -4.61,-4.135 -4.61,-4.61 -4.135,-4.61 ; -4.61,4.135 -4.61,4.37 ; -4.31,4.61 -4.135,4.61 ; 4.135,-4.61 4.61,-4.61 4.61,-4.135 ; 4.135,4.61 4.61,4.61 4.61,4.135
Top Component Center:
  lines w0.127: -0.127,0 0.127,0 -0.127,0 ; 0,-0.127 0,0.127 0,-0.127
Top Assembly:
  region: 4.5,-4.5 -4.5,-4.5 -4.5,3.5 -3.5,4.5 4.5,4.5
Top Courtyard:
  lines w0.254: -5.1,-4.13 -4.75,-4.13 -4.75,-4.75 -4.13,-4.75 -4.13,-5.1 4.13,-5.1 4.13,-4.75 4.75,-4.75 4.75,-4.13 5.1,-4.13 5.1,4.13 4.75,4.13 4.75,4.75 4.13,4.75 4.13,5.1 -4.13,5.1 -4.13,4.75 -4.75,4.75 -4.75,4.13 -5.1,4.13 -5.1,-4.13
Top Designator:
  text ".Designator" at -3.43,-0.344 h1.52
3D body "QFN-64-1EP_9x9mm_P0.5mm_EP4.1x4.1mm.step": height 0.95, standoff 0, extent -4.5,-4.5 4.5,4.5

## QFN-64-1EP_9x9mm_P0.5mm_EP4.1x4.1mm [mm] "QFN-64-1EP_9x9mm_P0.5mm_EP4.1x4.1mm"
pads (74):
  rrect25% 0.825x0.25 smd: 1(-4.437,3.75) 2(-4.437,3.25) 3(-4.437,2.75) 4(-4.437,2.25) 5(-4.437,1.75) 6(-4.437,1.25) 7(-4.437,0.75) 8(-4.437,0.25) 9(-4.437,-0.25) 10(-4.437,-0.75) 11(-4.437,-1.25) 12(-4.437,-1.75) 13(-4.437,-2.25) 14(-4.437,-2.75) 15(-4.437,-3.25) 16(-4.437,-3.75) 33(4.437,-3.75) 34(4.437,-3.25) 35(4.437,-2.75) 36(4.437,-2.25) 37(4.437,-1.75) 38(4.437,-1.25) 39(4.437,-0.75) 40(4.437,-0.25) 41(4.437,0.25) 42(4.437,0.75) 43(4.437,1.25) 44(4.437,1.75) 45(4.437,2.25) 46(4.437,2.75) 47(4.437,3.25) 48(4.437,3.75)
  rrect25% 0.25x0.825 smd: 17(-3.75,-4.437) 18(-3.25,-4.437) 19(-2.75,-4.437) 20(-2.25,-4.437) 21(-1.75,-4.437) 22(-1.25,-4.437) 23(-0.75,-4.437) 24(-0.25,-4.437) 25(0.25,-4.437) 26(0.75,-4.437) 27(1.25,-4.437) 28(1.75,-4.437) 29(2.25,-4.437) 30(2.75,-4.437) 31(3.25,-4.437) 32(3.75,-4.437) 49(3.75,4.437) 50(3.25,4.437) 51(2.75,4.437) 52(2.25,4.437) 53(1.75,4.437) 54(1.25,4.437) 55(0.75,4.437) 56(0.25,4.437) 57(-0.25,4.437) 58(-0.75,4.437) 59(-1.25,4.437) 60(-1.75,4.437) 61(-2.25,4.437) 62(-2.75,4.437) 63(-3.25,4.437) 64(-3.75,4.437)
  rect 4.1x4.1 smd: 65(0,0)
  rrect23% 1.1x1.1 on Top Paste: Un1(-1.37,1.37) Un2(-1.37,0) Un3(-1.37,-1.37) Un4(0,1.37) Un5(0,0) Un6(0,-1.37) Un7(1.37,1.37) Un8(1.37,0) Un9(1.37,-1.37)
F.SilkS:
  region: -4.61,4.61 -4.85,4.94 -4.37,4.94
  lines w0.254: -4.61,-4.135 -4.61,-4.61 -4.135,-4.61 ; -4.61,4.135 -4.61,4.37 ; -4.31,4.61 -4.135,4.61 ; 4.135,-4.61 4.61,-4.61 4.61,-4.135 ; 4.135,4.61 4.61,4.61 4.61,4.135
Top Component Center:
  lines w0.127: -0.127,0 0.127,0 -0.127,0 ; 0,-0.127 0,0.127 0,-0.127
Top Assembly:
  region: 4.5,-4.5 -4.5,-4.5 -4.5,3.5 -3.5,4.5 4.5,4.5
Top Courtyard:
  lines w0.254: -5.1,-4.13 -4.75,-4.13 -4.75,-4.75 -4.13,-4.75 -4.13,-5.1 4.13,-5.1 4.13,-4.75 4.75,-4.75 4.75,-4.13 5.1,-4.13 5.1,4.13 4.75,4.13 4.75,4.75 4.13,4.75 4.13,5.1 -4.13,5.1 -4.13,4.75 -4.75,4.75 -4.75,4.13 -5.1,4.13 -5.1,-4.13
Top Designator:
  text ".Designator" at -3.43,-0.344 h1.52
3D body "QFN-64-1EP_9x9mm_P0.5mm_EP4.1x4.1mm.step": height 0.95, standoff 0, extent -4.5,-4.5 4.5,4.5

## QFN-64-1EP_9x9mm_P0.5mm_EP4.1x4.1mm_ThermalVias [mm] "QFN-64-1EP_9x9mm_P0.5mm_EP4.1x4.1mm_ThermalVias"
pads (84):
  rrect25% 0.825x0.25 smd: 1(-4.437,3.75) 2(-4.437,3.25) 3(-4.437,2.75) 4(-4.437,2.25) 5(-4.437,1.75) 6(-4.437,1.25) 7(-4.437,0.75) 8(-4.437,0.25) 9(-4.437,-0.25) 10(-4.437,-0.75) 11(-4.437,-1.25) 12(-4.437,-1.75) 13(-4.437,-2.25) 14(-4.437,-2.75) 15(-4.437,-3.25) 16(-4.437,-3.75) 33(4.437,-3.75) 34(4.437,-3.25) 35(4.437,-2.75) 36(4.437,-2.25) 37(4.437,-1.75) 38(4.437,-1.25) 39(4.437,-0.75) 40(4.437,-0.25) 41(4.437,0.25) 42(4.437,0.75) 43(4.437,1.25) 44(4.437,1.75) 45(4.437,2.25) 46(4.437,2.75) 47(4.437,3.25) 48(4.437,3.75)
  rrect25% 0.25x0.825 smd: 17(-3.75,-4.437) 18(-3.25,-4.437) 19(-2.75,-4.437) 20(-2.25,-4.437) 21(-1.75,-4.437) 22(-1.25,-4.437) 23(-0.75,-4.437) 24(-0.25,-4.437) 25(0.25,-4.437) 26(0.75,-4.437) 27(1.25,-4.437) 28(1.75,-4.437) 29(2.25,-4.437) 30(2.75,-4.437) 31(3.25,-4.437) 32(3.75,-4.437) 49(3.75,4.437) 50(3.25,4.437) 51(2.75,4.437) 52(2.25,4.437) 53(1.75,4.437) 54(1.25,4.437) 55(0.75,4.437) 56(0.25,4.437) 57(-0.25,4.437) 58(-0.75,4.437) 59(-1.25,4.437) 60(-1.75,4.437) 61(-2.25,4.437) 62(-2.75,4.437) 63(-3.25,4.437) 64(-3.75,4.437)
  round 0.5 hole 0.2: 65(-1.8,-1.8) 65(-1.8,0) 65(-1.8,1.8) 65(0,-1.8) 65(0,0) 65(0,1.8) 65(1.8,-1.8) 65(1.8,0) 65(1.8,1.8)
  rect 4.1x4.1 smd: 65(0,0)
  rect 4.1x4.1 smd far side: 65(0,0)
  rrect23% 1.1x1.1 on Top Paste: Un1(-1.37,1.37) Un2(-1.37,0) Un3(-1.37,-1.37) Un4(0,1.37) Un5(0,0) Un6(0,-1.37) Un7(1.37,1.37) Un8(1.37,0) Un9(1.37,-1.37)
F.SilkS:
  region: -4.61,4.61 -4.85,4.94 -4.37,4.94
  lines w0.254: -4.61,-4.135 -4.61,-4.61 -4.135,-4.61 ; -4.61,4.135 -4.61,4.37 ; -4.31,4.61 -4.135,4.61 ; 4.135,-4.61 4.61,-4.61 4.61,-4.135 ; 4.135,4.61 4.61,4.61 4.61,4.135
Top Component Center:
  lines w0.127: -0.127,0 0.127,0 -0.127,0 ; 0,-0.127 0,0.127 0,-0.127
Top Assembly:
  region: 4.5,-4.5 -4.5,-4.5 -4.5,3.5 -3.5,4.5 4.5,4.5
Top Courtyard:
  lines w0.254: -5.1,-4.13 -5.1,4.13 -4.75,4.13 -4.75,4.75 -4.13,4.75 -4.13,5.1 4.13,5.1 4.13,4.75 4.75,4.75 4.75,4.13 5.1,4.13 5.1,-4.13 4.75,-4.13 4.75,-4.75 4.13,-4.75 4.13,-5.1 -4.13,-5.1 -4.13,-4.75 -4.75,-4.75 -4.75,-4.13 -5.1,-4.13
Top Designator:
  text ".Designator" at -3.43,-0.344 h1.52
3D body "QFN-64-1EP_9x9mm_P0.5mm_EP4.1x4.1mm.step": height 0.95, standoff 0, extent -4.5,-4.5 4.5,4.5

## QFN-64-1EP_9x9mm_P0.5mm_EP4.7x4.7mm [mm] "QFN-64-1EP_9x9mm_P0.5mm_EP4.7x4.7mm"
pads (74):
  rrect25% 0.875x0.2 smd: 1(-4.413,3.75) 2(-4.413,3.25) 3(-4.413,2.75) 4(-4.413,2.25) 5(-4.413,1.75) 6(-4.413,1.25) 7(-4.413,0.75) 8(-4.413,0.25) 9(-4.413,-0.25) 10(-4.413,-0.75) 11(-4.413,-1.25) 12(-4.413,-1.75) 13(-4.413,-2.25) 14(-4.413,-2.75) 15(-4.413,-3.25) 16(-4.413,-3.75) 33(4.413,-3.75) 34(4.413,-3.25) 35(4.413,-2.75) 36(4.413,-2.25) 37(4.413,-1.75) 38(4.413,-1.25) 39(4.413,-0.75) 40(4.413,-0.25) 41(4.413,0.25) 42(4.413,0.75) 43(4.413,1.25) 44(4.413,1.75) 45(4.413,2.25) 46(4.413,2.75) 47(4.413,3.25) 48(4.413,3.75)
  rrect25% 0.2x0.875 smd: 17(-3.75,-4.413) 18(-3.25,-4.413) 19(-2.75,-4.413) 20(-2.25,-4.413) 21(-1.75,-4.413) 22(-1.25,-4.413) 23(-0.75,-4.413) 24(-0.25,-4.413) 25(0.25,-4.413) 26(0.75,-4.413) 27(1.25,-4.413) 28(1.75,-4.413) 29(2.25,-4.413) 30(2.75,-4.413) 31(3.25,-4.413) 32(3.75,-4.413) 49(3.75,4.413) 50(3.25,4.413) 51(2.75,4.413) 52(2.25,4.413) 53(1.75,4.413) 54(1.25,4.413) 55(0.75,4.413) 56(0.25,4.413) 57(-0.25,4.413) 58(-0.75,4.413) 59(-1.25,4.413) 60(-1.75,4.413) 61(-2.25,4.413) 62(-2.75,4.413) 63(-3.25,4.413) 64(-3.75,4.413)
  rect 4.7x4.7 smd: 65(0,0)
  rrect20% 1.26x1.26 on Top Paste: Un1(-1.57,1.57) Un2(-1.57,0) Un3(-1.57,-1.57) Un4(0,1.57) Un5(0,0) Un6(0,-1.57) Un7(1.57,1.57) Un8(1.57,0) Un9(1.57,-1.57)
F.SilkS:
  region: -4.61,4.61 -4.85,4.94 -4.37,4.94
  lines w0.254: -4.61,-4.11 -4.61,-4.61 -4.11,-4.61 ; -4.61,4.11 -4.61,4.37 ; -4.31,4.61 -4.11,4.61 ; 4.11,-4.61 4.61,-4.61 4.61,-4.11 ; 4.11,4.61 4.61,4.61 4.61,4.11
Top Component Center:
  lines w0.127: -0.127,0 0.127,0 -0.127,0 ; 0,-0.127 0,0.127 0,-0.127
Top Assembly:
  region: 4.5,-4.5 -4.5,-4.5 -4.5,3.5 -3.5,4.5 4.5,4.5
Top Courtyard:
  lines w0.254: -5.1,-4.1 -5.1,4.1 -4.75,4.1 -4.75,4.75 -4.1,4.75 -4.1,5.1 4.1,5.1 4.1,4.75 4.75,4.75 4.75,4.1 5.1,4.1 5.1,-4.1 4.75,-4.1 4.75,-4.75 4.1,-4.75 4.1,-5.1 -4.1,-5.1 -4.1,-4.75 -4.75,-4.75 -4.75,-4.1 -5.1,-4.1
Top Designator:
  text ".Designator" at -3.43,-0.344 h1.52
3D body "QFN-64-1EP_9x9mm_P0.5mm_EP4.1x4.1mm.step": height 0.95, standoff 0, extent -4.5,-4.5 4.5,4.5